# Altium footprint library HeltecModule.PCBLIB: 7 footprints
Each footprint in its own frame and in the unit in brackets; x right, y up, seen from the top. Pads: shape width x height; smd on the part's side, far side on the other; paste and mask are expansions set on the pad; w line width, h text height; cw(c..) or ccw(c..) is an arc to the next point about the centre after c.
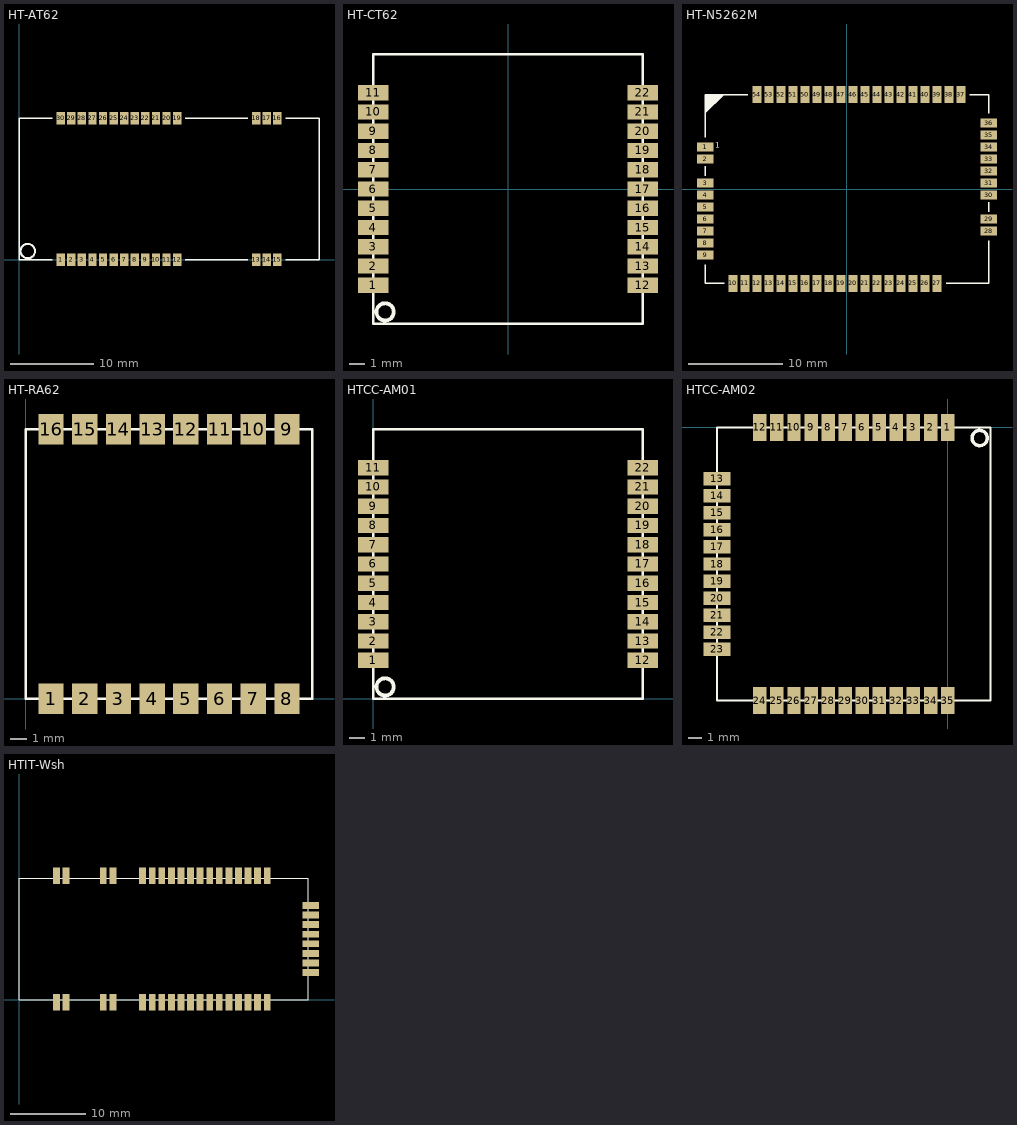
[diagram p0: the footprints below, top view; thin cyan lines are the x and y axes]

## HT-AT62 [mm]
pads (30):
  rect 1x1.5 smd: 1(5,0) 2(6.27,0) 3(7.54,0) 4(8.81,0) 5(10.08,0) 6(11.35,0) 7(12.62,0) 8(13.89,0) 9(15.16,0) 10(16.43,0) 11(17.7,0) 12(18.97,0) 13(28.46,0) 14(29.73,0) 15(31,0) 16(31,17) 17(29.73,17) 18(28.46,17) 19(18.97,17) 20(17.7,17) 21(16.43,17) 22(15.16,17) 23(13.89,17) 24(12.62,17) 25(11.35,17) 26(10.08,17) 27(8.81,17) 28(7.54,17) 29(6.27,17) 30(5,17)
Top Overlay:
  circle w0.254: c1.05,1.05 r0.864
  lines w0.152: 4,0 0,0 0,17 4,17 ; 19.97,0 27.46,0 ; 19.97,17 27.46,17 ; 32,0 36,0 36,17 32,17

## HT-CT62 [mm]
pads (22):
  rect 2x1 smd: 1(-8.89,-6.35) 2(-8.89,-5.08) 3(-8.89,-3.81) 4(-8.89,-2.54) 5(-8.89,-1.27) 6(-8.89,0) 7(-8.89,1.27) 8(-8.89,2.54) 9(-8.89,3.81) 10(-8.89,5.08) 11(-8.89,6.35) 12(8.89,-6.35) 13(8.89,-5.08) 14(8.89,-3.81) 15(8.89,-2.54) 16(8.89,-1.27) 17(8.89,0) 18(8.89,1.27) 19(8.89,2.54) 20(8.89,3.81) 21(8.89,5.08) 22(8.89,6.35)
Top Overlay:
  circle w0.254: c-8.103,-8.103 r0.568
  lines w0.152: -8.89,-8.89 -8.89,8.89 8.89,8.89 8.89,-8.89 -8.89,-8.89

## HT-N5262M [mm]
pads (54):
  rect 1.75x0.9 smd: 1(-15,4.445) 2(-15,3.175) 3(-15,0.635) 4(-15,-0.635) 5(-15,-1.905) 6(-15,-3.175) 7(-15,-4.445) 8(-15,-5.715) 9(-15,-6.985) 28(15,-4.445) 29(15,-3.175) 30(15,-0.635) 31(15,0.635) 32(15,1.905) 33(15,3.175) 34(15,4.445) 35(15,5.715) 36(15,6.985)
  rect 0.9x1.75 smd: 10(-12.065,-10) 11(-10.795,-10) 12(-9.525,-10) 13(-8.255,-10) 14(-6.985,-10) 15(-5.715,-10) 16(-4.445,-10) 17(-3.175,-10) 18(-1.905,-10) 19(-0.635,-10) 20(0.635,-10) 21(1.905,-10) 22(3.175,-10) 23(4.445,-10) 24(5.715,-10) 25(6.985,-10) 26(8.255,-10) 27(9.525,-10) 37(12.065,10) 38(10.795,10) 39(9.525,10) 40(8.255,10) 41(6.985,10) 42(5.715,10) 43(4.445,10) 44(3.175,10) 45(1.905,10) 46(0.635,10) 47(-0.635,10) 48(-1.905,10) 49(-3.175,10) 50(-4.445,10) 51(-5.715,10) 52(-6.985,10) 53(-8.255,10) 54(-9.525,10)
Top Overlay:
  region: -13,10 -15,8 -15,10
  lines w0.152: -15,-8 -15,-10 -13,-10 ; -15,1.397 -15,2.397 ; -15,5.5 -15,10 -10.5,10 ; 10.5,-10 15,-10 15,-5.5 ; 13,10 15,10 15,8 ; 15,-2.397 15,-1.397
  text "1" at -13.919,4.135 h1.02

## HT-RA62 [mm]
pads (16):
  rect 1.5x1.8 smd: 1(1.5,0) 2(3.5,0) 3(5.5,0) 4(7.5,0) 5(9.5,0) 6(11.5,0) 7(13.5,0) 8(15.5,0) 9(15.5,16) 10(13.5,16) 11(11.5,16) 12(9.5,16) 13(7.5,16) 14(5.5,16) 15(3.5,16) 16(1.5,16)
Top Overlay:
  lines w0.152: 0,0 0,16 17,16 17,0 0,0

## HTCC-AM01 [mm]
pads (22):
  rect 2x1 smd: 1(0,2.54) 2(0,3.81) 3(0,5.08) 4(0,6.35) 5(0,7.62) 6(0,8.89) 7(0,10.16) 8(0,11.43) 9(0,12.7) 10(0,13.97) 11(0,15.24) 12(17.78,2.54) 13(17.78,3.81) 14(17.78,5.08) 15(17.78,6.35) 16(17.78,7.62) 17(17.78,8.89) 18(17.78,10.16) 19(17.78,11.43) 20(17.78,12.7) 21(17.78,13.97) 22(17.78,15.24)
Top Overlay:
  circle w0.254: c0.787,0.787 r0.568
  lines w0.152: 0,0 17.78,0 17.78,17.78 0,17.78 0,0

## HTCC-AM02 [mm]
pads (35):
  rect 1x2 smd: 1(0,0) 2(-1.27,0) 3(-2.54,0) 4(-3.81,0) 5(-5.08,0) 6(-6.35,0) 7(-7.62,0) 8(-8.89,0) 9(-10.16,0) 10(-11.43,0) 11(-12.7,0) 12(-13.97,0) 24(-13.97,-20.32) 25(-12.7,-20.32) 26(-11.43,-20.32) 27(-10.16,-20.32) 28(-8.89,-20.32) 29(-7.62,-20.32) 30(-6.35,-20.32) 31(-5.08,-20.32) 32(-3.81,-20.32) 33(-2.54,-20.32) 34(-1.27,-20.32) 35(0,-20.32)
  rect 2x1 smd: 13(-17.145,-3.81) 14(-17.145,-5.08) 15(-17.145,-6.35) 16(-17.145,-7.62) 17(-17.145,-8.89) 18(-17.145,-10.16) 19(-17.145,-11.43) 20(-17.145,-12.7) 21(-17.145,-13.97) 22(-17.145,-15.24) 23(-17.145,-16.51)
Top Overlay:
  circle w0.254: c2.388,-0.787 r0.568
  lines w0.152: 0.635,0 0.686,0 ; -17.145,-20.32 -17.145,0 3.175,0 3.175,-20.32 -17.145,-20.32

## HTIT-Wsh [mm]
pads (44):
  rect 0.9x2.2 smd: 1(4.953,-0.3) 2(6.223,-0.3) 3(11.176,-0.3) 4(12.446,-0.3) 5(16.383,-0.3) 6(17.653,-0.3) 7(18.923,-0.3) 8(20.193,-0.3) 9(21.463,-0.3) 10(22.733,-0.3) 11(24.003,-0.3) 12(25.273,-0.3) 13(26.543,-0.3) 14(27.813,-0.3) 15(29.083,-0.3) 16(30.353,-0.3) 17(31.623,-0.3) 18(32.893,-0.3) 27(32.893,16.429) 28(31.623,16.429) 29(30.353,16.429) 30(29.083,16.429) 31(27.813,16.429) 32(26.543,16.429) 33(25.273,16.429) 34(24.003,16.429) 35(22.733,16.429) 36(21.463,16.429) 37(20.193,16.429) 38(18.923,16.429) 39(17.653,16.429) 40(16.383,16.429) 41(12.446,16.429) 42(11.176,16.429) 43(6.223,16.429) 44(4.953,16.429)
  rect 2.2x0.9 smd: 19(38.654,3.619) 20(38.654,4.889) 21(38.654,6.159) 22(38.654,7.429) 23(38.654,8.7) 24(38.654,9.97) 25(38.654,11.239) 26(38.654,12.509)
Top Overlay:
  lines w0.152: 0,0 38.354,0 38.354,16.129 0,16.129 0,0